# Altium schematic symbol library TS3USB221ARSER.SchLib: 1 symbol
Pins are listed as number, name and electrical type; pins without a type are passive.

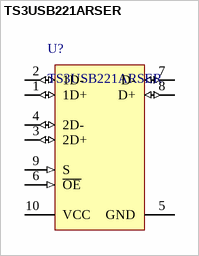
[diagram p0: symbol TS3USB221ARSER]

## TS3USB221ARSER
designator U?
ESD Protected,High-Speed USB 2.0 (480-Mbps) 1:2 Multiplexer / Demultiplexer Switch, 1:2 Mux / Demux, 6 ohm RON, 2.5 to 3.3V, -40 to 85 degC, 10-Pin UQFN (RSE), Green (RoHS & no Sb/Br); Manufacturer: Texas Instruments; Vcc range(V): 2.3 to 3.6; RON Flatness(Max)(Ohms): 1; ICC(uA): 30; SubFamily: USB Switch; ron(max)(ohms): 6; Number of Channels: 2; Bandwidth(MHz): 900; Architecture: "1","2 mux/demux"; OFF Time(Max)(ns): 12; ESD HBM(kV): +/-7; tpd max(ns): 0.25; RON Mis-match(Max)(Ohms): 0.2; Eco-Plan: Green (RoHS & no Sb/Br); PartNumber: TS3USB221ARSER; ComponentLink1Description: Datasheet; ComponentLink2Description: Package Specification; DatasheetVersion: SCDS277; ComponentLink1URL: http://www.ti.com/general/docs/lit/getliterature.tsp?genericPartNumber=TS3USB221A&fileType=pdf; Code_JEDEC: MO-288-UEFD; ComponentLink2URL: http://www.ti.com/lit/ml/mpqf186c/mpqf186c.pdf; IL OFF(Max)(nA): 2; PackageVersion: revD, Jan-2011; ON Time(Max)(ns): 30; Mounting Technology: Surface Mount; PackageReference: RSE0010A; PackageDescription: 10-Leads Plastic Quad Flatpack No-Lead, 2 x 1.5 x 0.55 mm Body, 0.5 mm Pitch
footprint RSE0010A_V
pins: 1 1D+ (io) "Bus B", 2 1D- (io) "Bus B", 3 2D+ (io) "Bus B", 4 2D- (io) "Bus B", 5 GND (power), 6 ~{OE} (in) "Bus-switch enable", 7 D- (io) "Bus A", 8 D+ (io) "Bus A", 9 S (in) "Select input", 10 VCC (power) "Power supply"